# Altium integrated library INA240A1PWR.IntLib: 1 symbol
Pins are listed as number, name and electrical type; pins without a type are passive.

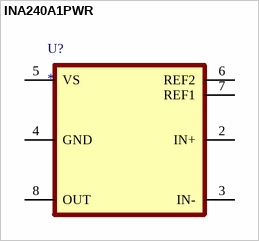
[diagram p0: symbol INA240A1PWR]

## INA240A1PWR
designator U?
footprint INA240A1PWR
pins: 2 IN+, 3 IN-, 4 GND, 5 VS, 6 REF2, 7 REF1, 8 OUT